# Altium footprint library CustomCase.PcbLib: 411 footprints (part 15 of 26)
Each footprint in its own frame and in the unit in brackets; x right, y up, seen from the top. Pads: shape width x height; smd on the part's side, far side on the other; paste and mask are expansions set on the pad; w line width, h text height; cw(c..) or ccw(c..) is an arc to the next point about the centre after c.
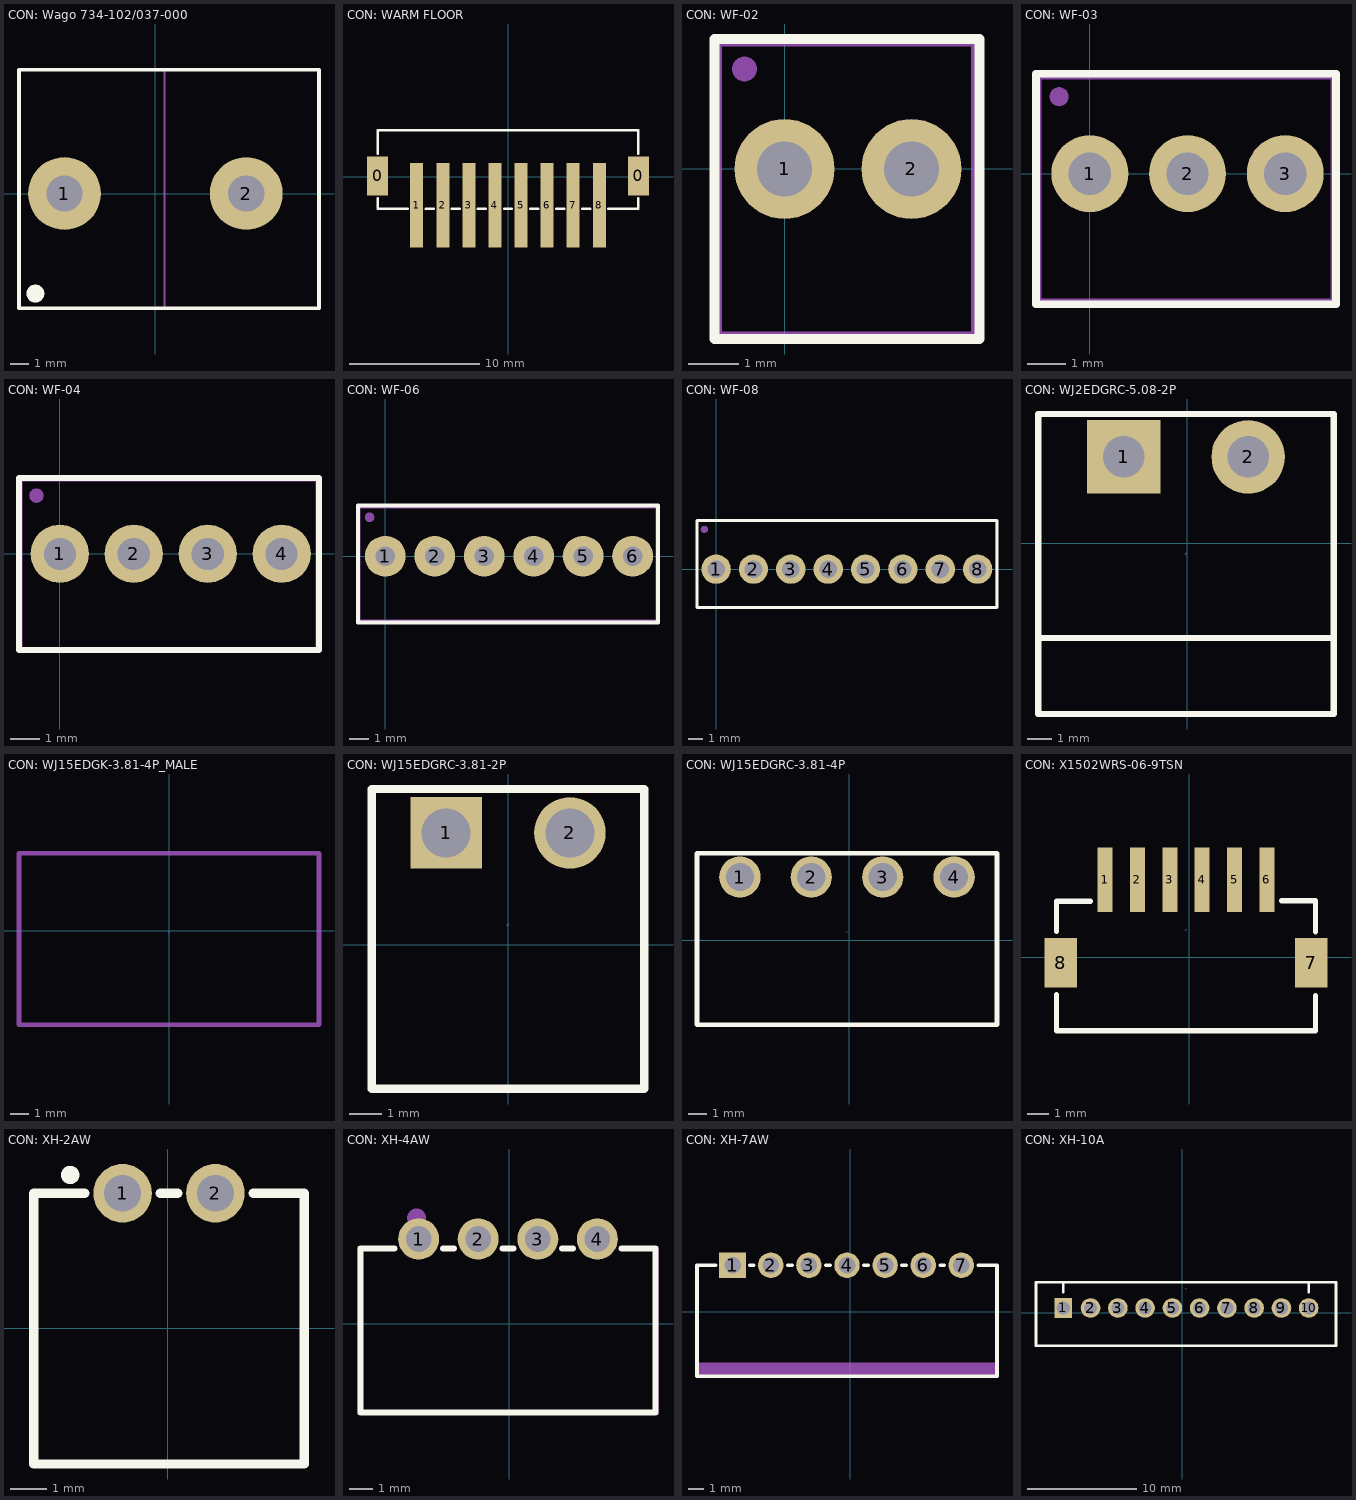
[diagram p14: the footprints below, top view; thin cyan lines are the x and y axes]

## CON: Wago 734-102/037-000 [mm]
pads (3):
  round 4 hole 2: 1(-5,0) 2(5,0)
  round 1 on Top Overlay: ""(-6.6,-5.5)
Top Overlay:
  lines w0.2: -7.5,-6.3 -7.5,6.8 9,6.8 9,-6.3 -7.5,-6.3
Top Assy:
  lines w0.1: 0.5,-6.25 0.5,6.8 ; -7.5,-6.3 -7.5,6.8 9,6.8 9,-6.3 -7.5,-6.3
Size Area:
  lines w0.1: -7.5,6.8 9,6.8 9,-6.3 -7.5,-6.3 -7.5,6.8
3D body "Pin N=2 v3.step": height 15.85, standoff -1.95, extent -7.5,-6.3 9,8

## CON: WARM FLOOR [mm]
pads (10):
  rect 1.6x3 smd: 0(-10.025,0.05) 0(9.975,0.05)
  rect 1x6.5 smd: 1(-7.025,-2.2) 2(-5.025,-2.2) 3(-3.025,-2.2) 4(-1.025,-2.2) 5(0.975,-2.2) 6(2.975,-2.2) 7(4.975,-2.2) 8(6.975,-2.2)
Top Overlay:
  lines w0.2: -10.025,-1.65 -10.025,-2.45 -7.725,-2.45 ; -10.025,1.75 -10.025,3.55 9.975,3.55 9.975,1.75 ; -6.325,-2.45 -5.725,-2.45 ; -4.325,-2.45 -3.725,-2.45 ; -2.325,-2.45 -1.725,-2.45 ; -0.325,-2.45 0.275,-2.45 ; 1.675,-2.45 2.275,-2.45 ; 3.675,-2.45 4.275,-2.45 ; 5.675,-2.45 6.275,-2.45 ; 7.675,-2.45 9.975,-2.45 ; 9.975,-1.65 9.975,-2.45 ; 9.975,-2.45 9.975,-2.45

## CON: WF-02 [mm]
pads (3):
  round 2 hole 1.1: 1(0,0) 2(2.54,0)
  round 0.5 on Mech1: ""(-0.8,2)
Top Overlay:
  lines w0.2: -1.4,-3.4 3.9,-3.4 3.9,2.6 -1.4,2.6 -1.4,-3.4
Top Assy:
  lines w0.1: -1.3,-3.3 -1.3,2.5 3.78,2.5 3.78,-3.3 -1.3,-3.3
3D body "User Library-WF-02.STEP": height 11.5, standoff -3.3, extent -1.3,-3.3 3.78,2.5

## CON: WF-03 [mm]
pads (4):
  round 2 hole 1.1: 1(0,0) 2(2.54,0) 3(5.08,0)
  round 0.5 on Mech1: ""(-0.8,2)
Top Overlay:
  lines w0.2: -1.4,-3.4 -1.4,2.6 6.4,2.6 6.4,-3.4 -1.4,-3.4
Top Assy:
  lines w0.1: -1.31,-3.3 -1.31,2.5 6.31,2.5 6.31,-3.3 -1.31,-3.3
3D body "User Library-WF-03.STEP": height 11.5, standoff -3.3, extent -1.31,-3.3 6.31,2.5

## CON: WF-04 [mm]
pads (5):
  round 2 hole 1.1: 1(0,0) 2(2.54,0) 3(5.08,0) 4(7.62,0)
  round 0.5 on Mech1: ""(-0.8,2)
Top Overlay:
  lines w0.2: -1.4,-3.3 -1.4,2.6 8.9,2.6 8.9,-3.3 -1.4,-3.3
Top Assy:
  lines w0.1: -1.33,-3.273 -1.33,2.527 8.83,2.527 8.83,-3.273 -1.33,-3.273
3D body "User Library-WF-04.STEP": height 11.66, standoff -3.14, extent -1.33,-3.273 8.83,2.527

## CON: WF-06 [mm]
pads (7):
  round 2.1 hole 1: 1(0,0) 2(2.54,0) 3(5.08,0) 4(7.62,0) 5(10.16,0) 6(12.7,0)
  round 0.5 on Mech1: ""(-0.8,2)
Top Overlay:
  lines w0.2: -1.4,-3.4 14,-3.4 14,2.6 -1.4,2.6 -1.4,-3.4
Top Assy:
  lines w0.1: -1.32,-3.3 13.92,-3.3 13.92,2.5 -1.32,2.5 -1.32,-3.3
3D body "User Library-WF-06.STEP": height 11.5, standoff -3.3, extent -1.32,-3.3 13.92,2.5

## CON: WF-08 [mm]
pads (9):
  round 2 hole 1.2: 1(0,0) 2(2.54,0) 3(5.08,0) 4(7.62,0) 5(10.16,0) 6(12.7,0) 7(15.24,0) 8(17.78,0)
  round 0.5 on Mech1: ""(-0.8,2.7)
Top Overlay:
  lines w0.2: -1.3,-2.6 -1.3,3.3 19.1,3.3 19.1,-2.6 -1.3,-2.6
Top Assy:
  lines w0.1: -1.27,-2.54 19.05,-2.54 19.05,3.26 -1.27,3.26 -1.27,-2.54
3D body "User Library-WF-8.STEP": height 11.4, standoff -3.4, extent -1.27,-2.54 19.05,3.26

## CON: WJ2EDGRC-5.08-2P [mm]
pads (2):
  rect 3x3 hole 1.7: 1(-2.583,3.529)
  round 3 hole 1.7: 2(2.497,3.529)
Top Overlay:
  lines w0.254: -6.073,-3.871 5.987,-3.871 ; -6.073,5.229 -6.073,-6.971 5.987,-6.971 5.987,5.229 ; -6.073,5.279 5.987,5.279
Size Area:
  lines w0.003: -0.068,-0.445 -0.018,-0.394
3D body "WJ2EDGRC-5.08-2P.stp": height 8.66, standoff -2.54, extent -6.485,-6.551 6.475,5.451

## CON: WJ15EDGK-3.81-4P_MALE [mm]
Top Assy:
  lines w0.003: -0.051,-0.121 0,-0.07
  lines w0.254: -8.026,-5.02 -8.026,4.13 7.976,4.13 7.976,-5.014 7.722,-5.014 -8.026,-5.014
3D body "WJ15EDGK-3.81-4P_MALE.stp": height 7.4, standoff -3.7, extent -7.64,-14.675 7.6,1.425

## CON: WJ15EDGRC-3.81-2P [mm]
pads (2):
  rect 2.2x2.2 hole 1.5: 1(-1.913,3.435)
  round 2.2 hole 1.5: 2(1.897,3.435)
Top Overlay:
  lines w0.254: -4.199,-4.445 -4.199,4.705 ; -4.199,-4.439 4.183,-4.439 4.183,4.705 ; -4.199,4.785 4.183,4.785
Size Area:
  lines w0.003: -0.033,0.581 0.017,0.632
3D body "KEFA 3_81mm_2pin_RA.step": height 7.88, standoff -3.4, extent -4.527,-13.639 4.483,4.761

## CON: WJ15EDGRC-3.81-4P [mm]
pads (4):
  round 2.2 hole 1.5: 1(-5.842,3.36) 2(-2.032,3.36) 3(1.778,3.36) 4(5.588,3.36)
Top Overlay:
  lines w0.254: -8.128,-4.52 -8.128,4.63 7.874,4.63 7.874,-4.514 7.62,-4.514 -8.128,-4.514
Size Area:
  lines w0.003: -0.152,0.379 -0.102,0.43
3D body "3.81-4p.stp": height 7.25, standoff -3.45, extent -9.465,-4.475 9.265,4.725

## CON: X1502WRS-06-9TSN [mm]
pads (8):
  rect 0.7x3 smd: 1(-3.902,3.592) 2(-2.402,3.592) 3(-0.902,3.592) 4(0.598,3.592) 5(2.098,3.592) 6(3.598,3.592)
  rect 1.5x2.3 smd: 7(5.648,-0.258) 8(-5.952,-0.258)
Top Overlay:
  lines w0.254: -6.152,-1.738 -6.152,-3.408 5.848,-3.408 5.848,-1.778 ; -6.152,1.212 -6.152,2.592 -4.592,2.592 ; 4.287,2.617 5.847,2.617 ; 5.848,1.182 5.848,2.592
Size Area:
  lines w0.003: -0.177,1.241 -0.127,1.292

## CON: XH-2AW [mm]
pads (2):
  round 1.6 hole 1: 1(-1.233,3.687) 2(1.307,3.687)
Top Overlay:
  circle w0.3: c-2.663,4.187 r0.1
  lines w0.254: -2.264,3.687 -3.663,3.687 -3.663,-3.713 3.737,-3.713 3.737,3.687 2.338,3.687 ; -0.202,3.687 0.276,3.687
3D body "XH-2AW.step": height 6.55, standoff -3.4, extent -3.775,-3.625 3.825,5.175

## CON: XH-4AW [mm]
pads (4):
  round 1.75 hole 1.1 paste-2539.97 mask+0.05: 1(-3.854,3.623) 2(-1.314,3.623) 3(1.226,3.623) 4(3.766,3.623)
Top Overlay:
  lines w0.254: -4.885,3.223 -6.344,3.223 -6.344,-3.777 6.256,-3.777 6.256,3.223 4.797,3.223 ; -2.823,3.223 -2.345,3.223 ; -0.283,3.223 0.195,3.223 ; 2.257,3.223 2.735,3.223
Size Area:
  circle w0.4: c-3.944,4.523 r0.2
  region: -4.944,3.323 -4.944,3.123 -6.244,3.123 -6.244,-3.677 6.156,-3.677 6.156,3.123 4.756,3.123 4.756,3.323 6.356,3.323 6.356,-3.877 -6.444,-3.877 -6.444,3.323
3D body "User Library-XHB-4AW.step": height 6.55, standoff -3.4, extent -6.294,-3.696 6.206,5.104

## CON: XH-7AW [mm]
pads (7):
  rect 1.8x1.7 hole 1.1 paste-2539.97 mask+0.05: 1(-7.842,3.084)
  round 1.7 hole 1.1 paste-2539.97 mask+0.05: 2(-5.302,3.084) 3(-2.762,3.084) 4(-0.222,3.084) 5(2.318,3.084) 6(4.858,3.084) 7(7.398,3.084)
Top Overlay:
  lines w0.254: -8.973,3.084 -10.222,3.084 -10.222,-4.316 9.778,-4.316 9.778,3.084 8.529,3.084 ; -6.711,3.084 -6.433,3.084 ; -4.171,3.084 -3.893,3.084 ; -1.631,3.084 -1.353,3.084 ; 0.909,3.084 1.187,3.084 ; 3.449,3.084 3.727,3.084 ; 5.989,3.084 6.267,3.084
Size Area:
  region: -10.222,-3.416 9.778,-3.416 9.778,-4.316 -10.222,-4.316 -10.222,-4.016
3D body: height 5.9, standoff 0, extent -10.222,-4.316 9.778,3.084

## CON: XH-10A [mm]
pads (10):
  rect 1.6x1.8 hole 1.2: 1(-10.889,0.445)
  round 1.8 hole 1.2: 2(-8.389,0.445) 3(-5.889,0.445) 4(-3.389,0.445) 5(-0.889,0.445) 6(1.611,0.445) 7(4.111,0.445) 8(6.611,0.445) 9(9.111,0.445) 10(11.611,0.445)
Top Overlay:
  lines w0.254: -10.889,1.895 -10.889,2.795 ; 11.611,1.895 11.611,2.795 ; -13.389,-3.005 14.111,-3.005 14.111,2.795 -13.389,2.795 -13.389,-3.005
Size Area:
  lines w0.003: 0.336,2.206 0.386,2.257
3D body "JST - XH - Thru - 10Pin - 2.5mm (Genuine).stp": height 7.21, standoff -3, extent -13.226,-3.007 13.947,2.835